# Altium schematic symbol library J0011D21BNL.SchLib: 1 symbol
Pins are listed as number, name and electrical type; pins without a type are passive.

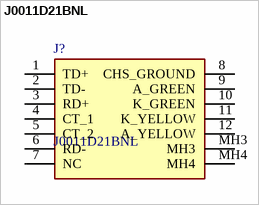
[diagram p0: symbol J0011D21BNL]

## J0011D21BNL
designator J?
Modular Connectors / Ethernet Connectors LEADED SINGLE PORT; Manufacturer_Name: Yageo Group; Geometry.Height: 16.39mm; Manufacturer_Part_Number: J0011D21BNL; Mouser Part Number: 673-J0011D21BNL; Mouser Price/Stock: https://www.mouser.co.uk/ProductDetail/Pulse-Electronics/J0011D21BNL?qs=9%2F6FFzrkRD68%2FMKMj9hCQA%3D%3D; Arrow Part Number: J0011D21BNL; Arrow Price/Stock: https://www.arrow.com/en/products/j0011d21bnl/pulse-electronics-corporation.html?utm_currency=USD&region=asia; Datasheet Link: https://www.mouser.de/datasheet/2/336/J403-370307.pdf
footprint J0011D21BNL
pins: 1 TD+, 2 TD-, 3 RD+, 4 CT_1, 5 CT_2, 6 RD-, 7 NC, 8 CHS_GROUND, 9 A_GREEN, 10 K_GREEN, 11 K_YELLOW, 12 A_YELLOW, MH3, MH4